# EAGLE library part B39431B3710U410 (library B39431B3710U410)
Signal Conditioning 433.92MHz 50ohms B3710 2dB 6V Source: Datasheet <https://www.digikey.com/en/products/detail/qualcomm-rf-front-end-rffe-filters/B39431B3710U410/699773?msockid=3bdc366bbe0663d83c1223c0bf3662a6>
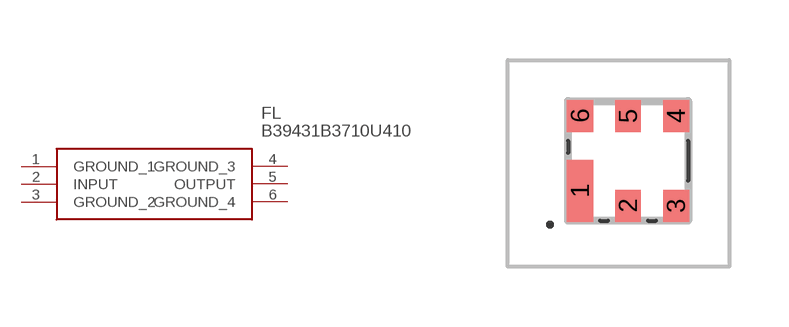
[diagram p0: symbol with the pads of B39431B3710U410; footprint B39431B3710U410]

Designator prefix FL

## B39431B3710U410 (Description: Signal Conditioning 433.92MHz 50ohms B3710 2dB 6V; Height: 1.225mm; Manufacturer_Name: RF360; Manufacturer_Part_Number: B39431B3710U410; Mouser_Part_Number: 871-B39431B3710U410; Mouser_Price-Stock: https://www.mouser.co.uk/ProductDetail/RF360/B39431B3710U410?qs=hkeJtpWWodAvZBWtdUV7AQ%3D%3D)  [B39431B3710U410]
1  GROUND_1
2  INPUT
3  GROUND_2
4  GROUND_3
5  OUTPUT
6  GROUND_4

## Footprint B39431B3710U410 (pad centres in mm)
B39431B3710U410-2
smd 0.65 x 1.55: 1 0,0
smd 0.65 x 0.8: 2 1.2,-0.375; 3 2.4,-0.375; 4 2.4,1.875; 5 1.2,1.875; 6 0,1.875